# Altium footprint library TAGCONNECT_TC2050-FP.PcbLib: 1 footprints
Each footprint in its own frame and in the unit in brackets; x right, y up, seen from the top. Pads: shape width x height; smd on the part's side, far side on the other; paste and mask are expansions set on the pad; w line width, h text height; cw(c..) or ccw(c..) is an arc to the next point about the centre after c.
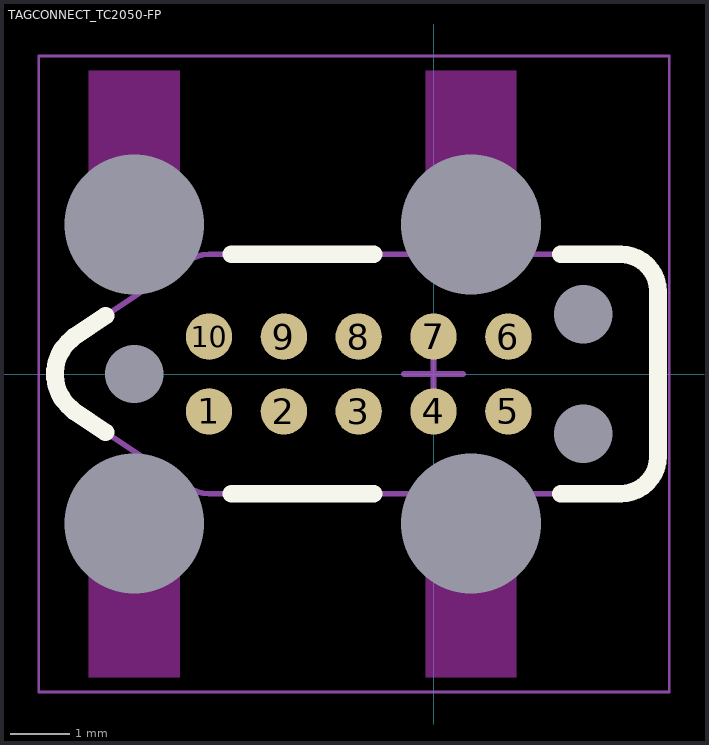
[diagram p0: the footprint, top view; thin cyan lines are the x and y axes]

## TAGCONNECT_TC2050-FP [mil]
pads (17):
  round 31 smd paste-15.5: 1(-150,-25) 2(-100,-25) 3(-50,-25) 4(0,-25) 5(50,-25) 6(50,25) 7(0,25) 8(-50,25) 9(-100,25) 10(-150,25)
  round 0 hole 93.5 unplated paste-99999: ""(-200,-100) ""(-200,100) ""(25,-100) ""(25,100)
  round 0 hole 39 unplated paste-99999: ""(-200,0) ""(100,-40) ""(100,40)
Top Overlay:
  lines w11.81: -241,-24 cw(c-223,0) -241,24 ; -240,-25 -219.2,-38.87 ; -240,25 -219.2,38.87 ; -135,-80 -40,-80 ; -135,80 -40,80 ; 85,-80 125,-80 ccw(c125,-55) 150,-55 150,55 ccw(c125,55) 125,80 85,80
Keep-Out Layer:
  rectangle: -5.5,-202.75 55.5,-100
  rectangle: -230.5,-202.75 -169.5,-100
  rectangle: -230.5,100 -169.5,202.75
  rectangle: -5.5,100 55.5,202.75
Mechanical 13:
  lines w3.94: -241,-24 cw(c-223,0) -241,24 ; -240,-25 -165,-75 ccw(c-150,-55) -150,-80 125,-80 ccw(c125,-55) 150,-55 150,55 ccw(c125,55) 125,80 -150,80 ccw(c-150,55) -165,75 -240,25
Mechanical 15:
  lines w1.97: -263.78,-212.6 157.48,-212.6 157.48,212.6 -263.78,212.6 -263.78,-212.6
  lines w3.94: -19.68,0 19.69,0 ; 0,-19.69 0,19.68